# Altium footprint library Footprint.PcbLib: 154 footprints (part 7 of 10)
Each footprint in its own frame and in the unit in brackets; x right, y up, seen from the top. Pads: shape width x height; smd on the part's side, far side on the other; paste and mask are expansions set on the pad; w line width, h text height; cw(c..) or ccw(c..) is an arc to the next point about the centre after c.
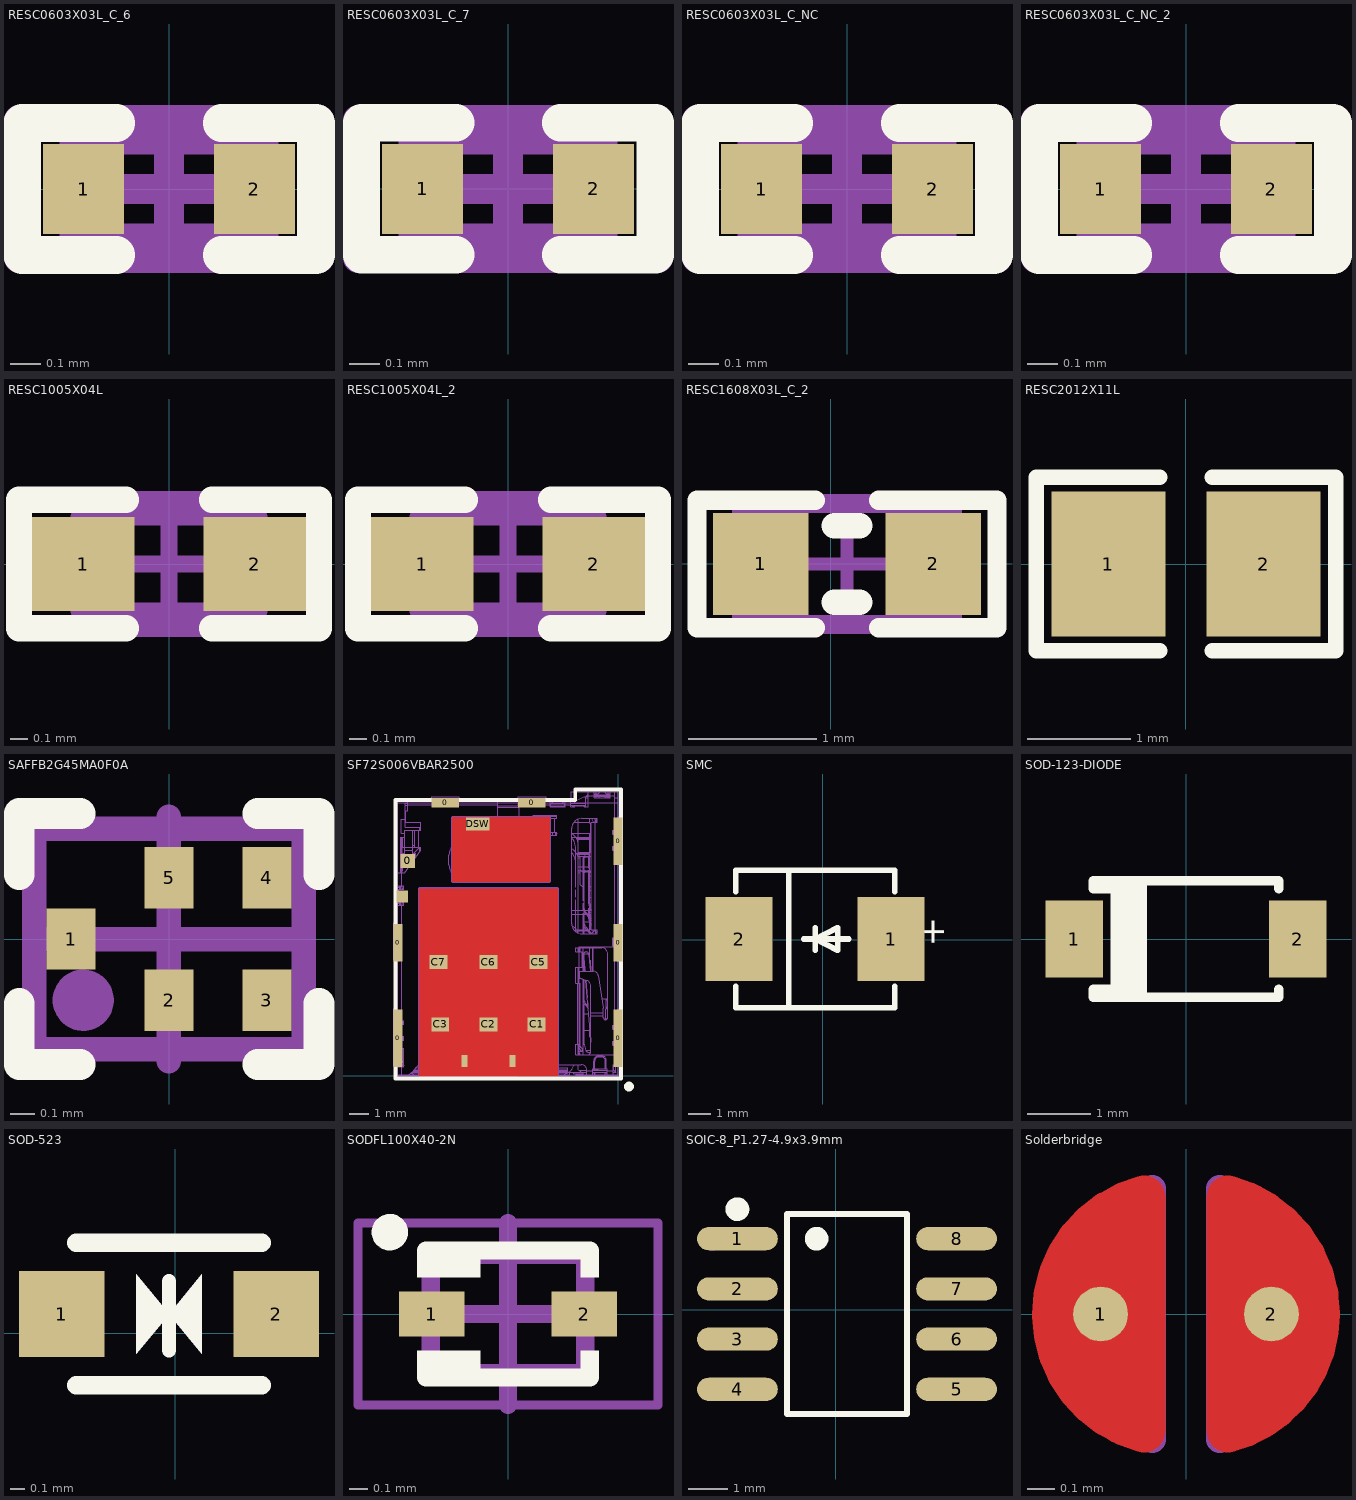
[diagram p6: the footprints below, top view; thin cyan lines are the x and y axes]

## RESC0603X03L_C_6 [mm]
pads (2):
  rect 0.27x0.3 smd: 1(-0.285,0) 2(0.285,0)
Top Overlay:
  lines w0.125: -0.175,-0.22 -0.49,-0.22 -0.49,0.22 -0.175,0.22 ; 0.175,-0.22 0.49,-0.22 0.49,0.22 0.175,0.22
Mechanical 7:
  lines w0.1: -0.315,-0.165 -0.315,0.165 0.315,0.165 0.315,-0.165 -0.315,-0.165
  text ".Designator" at -0.306,0.268 h0.3
Mechanical 15:
  lines w0.1: -0.165,0 0.165,0 ; 0,-0.165 0,0.165 ; -0.5,-0.23 -0.5,0.23 0.5,0.23 0.5,-0.23 -0.5,-0.23
3D body "User Library-res0201-1.step": height 0.23, standoff 0, extent -0.3,-0.15 0.3,0.15

## RESC0603X03L_C_7 [mm]
pads (2):
  rect 0.27x0.3 smd: 1(-0.285,0) 2(0.285,0)
Top Overlay:
  lines w0.125: -0.175,-0.22 -0.49,-0.22 -0.49,0.22 -0.175,0.22 ; 0.175,-0.22 0.49,-0.22 0.49,0.22 0.175,0.22
Mechanical 7:
  lines w0.1: -0.315,-0.165 -0.315,0.165 0.315,0.165 0.315,-0.165 -0.315,-0.165
  text ".Designator" at -0.306,0.268 h0.3
Mechanical 15:
  lines w0.1: -0.165,0 0.165,0 ; 0,-0.165 0,0.165 ; -0.5,-0.23 -0.5,0.23 0.5,0.23 0.5,-0.23 -0.5,-0.23
3D body "User Library-res0201-1.step": height 0.23, standoff 0, extent -0.3,-0.15 0.3,0.15

## RESC0603X03L_C_NC [mm]
pads (2):
  rect 0.27x0.3 smd: 1(-0.285,0) 2(0.285,0)
Top Overlay:
  lines w0.125: -0.175,-0.22 -0.49,-0.22 -0.49,0.22 -0.175,0.22 ; 0.175,-0.22 0.49,-0.22 0.49,0.22 0.175,0.22
Mechanical 7:
  lines w0.1: -0.315,-0.165 0.315,-0.165 0.315,0.165 -0.315,0.165 -0.315,-0.165
  text ".Designator" at -0.306,0.268 h0.3
Mechanical 15:
  lines w0.1: -0.165,0 0.165,0 ; 0,-0.165 0,0.165 ; -0.5,-0.23 0.5,-0.23 0.5,0.23 -0.5,0.23 -0.5,-0.23

## RESC0603X03L_C_NC_2 [mm]
pads (2):
  rect 0.27x0.3 smd: 1(-0.285,0) 2(0.285,0)
Top Overlay:
  lines w0.125: -0.175,-0.22 -0.49,-0.22 -0.49,0.22 -0.175,0.22 ; 0.175,-0.22 0.49,-0.22 0.49,0.22 0.175,0.22
Mechanical 7:
  lines w0.1: -0.315,-0.165 0.315,-0.165 0.315,0.165 -0.315,0.165 -0.315,-0.165
  text ".Designator" at -0.306,0.268 h0.3
Mechanical 15:
  lines w0.1: -0.165,0 0.165,0 ; 0,-0.165 0,0.165 ; -0.5,-0.23 0.5,-0.23 0.5,0.23 -0.5,0.23 -0.5,-0.23

## RESC1005X04L [mm]
pads (2):
  rect 0.6x0.55 smd: 1(-0.5,0) 2(0.5,0)
Top Overlay:
  lines w0.152: -0.25,-0.375 -0.875,-0.375 -0.875,0.375 -0.25,0.375 ; 0.25,-0.375 0.875,-0.375 0.875,0.375 0.25,0.375
Mechanical 7:
  lines w0.1: -0.525,-0.275 -0.525,0.275 0.525,0.275 0.525,-0.275 -0.525,-0.275
  text ".Designator" at -0.432,-0.152 h0.3
Mechanical 15:
  lines w0.1: -0.275,0 0.275,0 ; 0,-0.275 0,0.275 ; -0.875,-0.375 0.875,-0.375 0.875,0.375 -0.875,0.375 -0.875,-0.375
3D body "User Library-res0402-1.step": height 0.3, standoff 0, extent -0.5,-0.25 0.5,0.25

## RESC1005X04L_2 [mm]
pads (2):
  rect 0.6x0.55 smd: 1(-0.5,0) 2(0.5,0)
Top Overlay:
  lines w0.152: -0.25,-0.375 -0.875,-0.375 -0.875,0.375 -0.25,0.375 ; 0.25,-0.375 0.875,-0.375 0.875,0.375 0.25,0.375
Mechanical 7:
  lines w0.1: -0.525,-0.275 -0.525,0.275 0.525,0.275 0.525,-0.275 -0.525,-0.275
  text ".Designator" at -0.432,-0.152 h0.3
Mechanical 15:
  lines w0.1: -0.275,0 0.275,0 ; 0,-0.275 0,0.275 ; -0.875,-0.375 0.875,-0.375 0.875,0.375 -0.875,0.375 -0.875,-0.375
3D body "User Library-res0402-1.step": height 0.3, standoff 0, extent -0.5,-0.25 0.5,0.25

## RESC1608X03L_C_2 [mm]
pads (2):
  rect 0.75x0.8 smd mask+0.025: 1(-0.548,0) 2(0.802,0)
Top Overlay:
  lines w0.152: -0.123,-0.5 -1.048,-0.5 -1.048,0.5 -0.123,0.5 ; 0.377,-0.5 1.302,-0.5 1.302,0.5 0.377,0.5
  lines w0.2: 0.027,-0.3 0.227,-0.3 ; 0.027,0.3 0.227,0.3
Mechanical 7:
  lines w0.1: -0.723,-0.45 0.977,-0.45 0.977,0.45 -0.723,0.45 -0.723,-0.45
  text ".Designator" at -0.558,-0.142 h0.38
Mechanical 15:
  lines w0.1: -0.323,0 0.577,0 ; 0.127,-0.45 0.127,0.45 ; -1.048,-0.5 -1.048,0.5 1.302,0.5 1.302,-0.5 -1.048,-0.5
3D body "User Library-RESC1608X05N.step": height 0.45, standoff 0, extent -0.648,-0.425 0.902,0.425

## RESC2012X11L [mm]
pads (2):
  rect 1.1x1.4 smd mask+0.025: 1(-0.75,0) 2(0.75,0)
Top Overlay:
  lines w0.15: -0.254,-0.838 -1.448,-0.838 -1.448,0.838 -0.254,0.838 ; 0.254,-0.838 1.448,-0.838 1.448,0.838 0.254,0.838
3D body "User Library-0805 SMD Resistor.step": height 0.8, standoff 0.02, extent -1.025,-0.625 0.975,0.625

## SAFFB2G45MA0F0A [mm]
pads (5):
  rect 0.2x0.25 smd mask+0.04: 1(-0.4,0) 2(0,-0.25) 3(0.4,-0.25) 4(0.4,0.25) 5(0,0.25)
Top Overlay:
  lines w0.125: -0.613,-0.262 -0.613,-0.512 -0.362,-0.512 ; -0.613,0.262 -0.613,0.512 -0.362,0.512 ; 0.362,-0.512 0.613,-0.512 0.613,-0.262 ; 0.362,0.512 0.613,0.512 0.613,0.262
Mechanical 7:
  circle w0.15: c-0.35,-0.25 r0.05
  lines w0.1: -0.55,-0.45 0.55,-0.45 0.55,0.45 -0.55,0.45 -0.55,-0.45
  text ".Designator" at -0.4,0 h0.3
Mechanical 15:
  lines w0.05: -0.55,-0.45 -0.55,0.45 0.55,0.45 0.55,-0.45 -0.55,-0.45
  lines w0.1: -0.5,0 0.5,0 ; 0,-0.5 0,0.5
3D body: height 0.5, standoff 0, extent -0.55,-0.45 0.55,0.45

## SF72S006VBAR2500 [mm]
pads (18):
  rect 0.45x2.9 smd: 0(-11.175,1.9) 0(0,1.9)
  rect 0.45x1.9 smd: 0(-11.175,6.75) 0(0,6.75)
  rect 0.75x0.7 smd: 0(-10.675,10.9)
  rect 1.4x0.5 smd: 0(-8.78,13.85) 0(-4.38,13.85)
  rect 0.3x0.6 smd: 0(-7.8,0.75) 0(-5.36,0.75)
  rect 0.45x2.4 smd: 0(0,11.9)
  rect 0.9x0.7 smd: C1(-4.14,2.6) C2(-6.58,2.6) C3(-9.02,2.6) C5(-4.04,5.77) C6(-6.58,5.77) C7(-9.12,5.77)
  rect 0.6x0.6 smd: CSW(-10.95,9.1)
  rect 1.2x0.65 smd: DSW(-7.13,12.775)
Top Layer:
  pour cut-out: -10.084,9.5 -3.073,9.5 -3.073,-0.025 -10.084,-0.025
  pour cut-out: -8.407,13.106 -3.48,13.106 -3.48,9.855 -8.407,9.855
Top Overlay:
  lines w0.2: -11.3,-0.15 -11.3,14 -2.175,14 -2.175,14.525 0.15,14.525 0.15,-0.15 -11.3,-0.15
  lines w0.25: 0.443,-0.486 ccw(c0.55,-0.55) 0.462,-0.462
Mechanical 7:
  drawing of 1191 lines, arcs and shapes, not listed
  text ".Designator" at -6.214,5.15 h0.38
Mechanical 15:
  lines w0.05: -11.175,0 -11.175,13.85 0,13.85 0,0 -11.175,0
  lines w0.15: -5.16,0 -10.08,0 -10.08,9.5 -3.08,9.5 -3.08,0 ; -8.4,9.85 -3.48,9.85 -3.48,13.1 -8.4,13.1 -8.4,9.85
  text "NO VIA / NO TRACE" at -9.144,7.366 h0.55
  text "NO VIA / NO TRACE" at -8.382,10.668 h0.55
3D body "K3D-SF72S006VBA-V2_JAE_Proprietary.STEP": height 1.25, standoff 0, extent -11.2,0.05 0.02,14.4

## SMC [mm]
pads (2):
  rect 3.03x3.82 smd paste+0 mask+0.051: 1(3.102,0.037) 2(-3.768,0.037)
Top Overlay:
  lines w0.254: -3.933,-2.105 -3.933,-3.073 3.267,-3.073 3.267,-2.105 ; -3.933,2.178 -3.933,3.147 3.267,3.147 3.267,2.178 ; -1.525,-3.073 -1.525,3.147 ; -0.841,0.037 1.191,0.037 ; -0.333,0.545 -0.333,-0.471 -0.333,0.037 ; -0.333,0.037 0.683,-0.471 0.683,0.545 -0.333,0.037
  text "+" at 5.893,-0.305 h2
Mechanical 15:
  region: -4.663,0.291 -2.885,0.291 -2.885,-0.217 -4.663,-0.217
  region: 2.848,-0.858 2.848,0.92 3.356,0.92 3.356,-0.858
  region: 2.207,0.291 3.985,0.291 3.985,-0.217 2.207,-0.217
3D body "User Library-DO-214AB(SMC).step": height 2.77, standoff 0.13, extent -4.369,-3.15 3.759,3.15

## SOD-123-DIODE [mil]
pads (2):
  rect 36x48 smd: 1(-70,0) 2(70,0)
Top Overlay:
  region: -58.07,36.42 -58.07,28.54 -47.24,28.54 -47.24,-28.54 -58.07,-28.54 -58.07,-36.42 -24.61,-36.42 -24.61,36.42
  lines w5.91: -58.07,-31.5 -58.07,-36.42 58.07,-36.42 58.07,-31.5 ; -58.07,31.5 -58.07,36.42 58.07,36.42 58.07,31.5
3D body "User Library-SOD-123_DiodesInc.STEP": height 56.1, standoff -0.98, extent -76.77,-33.47 74.8,33.46

## SOD-523 [mm]
pads (2):
  rect 0.6x0.6 smd mask+0.08: 1(-0.792,0.133) 2(0.708,0.133)
Top Overlay:
  region: -0.042,0.133 -0.271,-0.146 -0.271,0.413
  region: -0.042,0.133 0.186,0.413 0.186,-0.146
  lines w0.1: -0.042,-0.121 -0.042,0.362
  lines w0.13: -0.692,-0.367 0.608,-0.367 ; -0.692,0.633 0.608,0.633
Mechanical 15:
  region: 0.186,0.413 0.186,-0.146 -0.042,0.133
  region: -0.271,0.413 -0.271,-0.146 -0.042,0.133
3D body "User Library-SOD523-3.STEP": height 0.65, standoff 0, extent -0.901,-0.273 0.749,0.527

## SODFL100X40-2N [mm]
pads (2):
  rect 0.36x0.25 smd: 1(-0.42,0) 2(0.42,0)
Top Overlay:
  circle w0.1: c-0.65,0.45 r0.05
  rectangle: -0.5,0.2 -0.15,0.325
  rectangle: -0.5,-0.35 -0.15,-0.2
  rectangle: 0.4,-0.35 0.5,-0.2
  rectangle: 0.4,0.2 0.5,0.35
  lines w0.1: -0.45,-0.3 -0.45,-0.35 0.45,-0.35 0.45,-0.3 ; -0.45,0.3 -0.45,0.35 0.45,0.35 0.45,0.3
Mechanical 7:
  lines w0.1: -0.425,-0.325 0.425,-0.325 0.425,0.325 -0.425,0.325 -0.425,-0.325
  text ".Designator" at -0.724,-0.177 h0.38
Mechanical 15:
  lines w0.05: -0.825,-0.5 -0.825,0.5 0.825,0.5 0.825,-0.5 -0.825,-0.5
  lines w0.1: -0.5,0 0.5,0 ; 0,-0.5 0,0.5
3D body "SODFL100X40-2N.step": height 0.4, standoff 0, extent -0.5,-0.325 0.5,0.325

## SOIC-8_P1.27-4.9x3.9mm [mm]
pads (8):
  oval 2.045x0.588 smd paste+0 mask+0.051: 1(-2.49,1.796) 2(-2.49,0.526) 3(-2.49,-0.744) 4(-2.49,-2.014) 5(3.055,-2.014) 6(3.055,-0.744) 7(3.055,0.526) 8(3.055,1.796)
Top Overlay:
  circle w0.3: c-0.487,1.796 r0.15
  circle w0.3: c-2.49,2.542 r0.15
  lines w0.152: -1.239,-2.635 1.804,-2.635 1.804,2.417 -1.239,2.417 -1.239,-2.635
Mechanical 15:
  circle w0.3: c-3.118,1.796 r0.15
3D body "User Library-SOIC-8-1.step": height 1.75, standoff 0, extent -2.766,-2.628 3.234,2.272

## Solderbridge [mm]
pads (2):
  round 0.2 smd paste-10: 1(-0.312,0) 2(0.312,0)
Top Layer:
  region: 0.077,0.432 0.152,0.505 0.271,0.467 0.335,0.424 0.409,0.351 0.462,0.292 0.521,0.193 0.549,0.099 0.544,-0.122 0.518,-0.193 0.434,-0.33 0.351,-0.411 0.259,-0.469 0.157,-0.5 0.107,-0.483 0.077,-0.43
  region: -0.077,-0.432 -0.152,-0.505 -0.271,-0.467 -0.335,-0.424 -0.409,-0.351 -0.462,-0.292 -0.521,-0.193 -0.549,-0.099 -0.544,0.122 -0.518,0.193 -0.434,0.33 -0.351,0.411 -0.259,0.469 -0.157,0.5 -0.107,0.483 -0.077,0.43
  lines w0.152: -0.153,-0.431 cw(c-0.042,0) -0.461,-0.149 cw(c-0.042,0) -0.153,0.431 ; 0.153,-0.431 ccw(c0.042,0) 0.413,-0.245 ccw(c0.042,0) 0.487,0 ccw(c0.042,0) 0.153,0.431
Top Solder:
  circle w0.61: c-0.003,0 r0.279
Mechanical 7:
  lines w0.1: -0.123,-0.459 cw(c-0.042,0) -0.123,0.459 -0.123,-0.459 ; 0.123,-0.459 ccw(c0.042,0) 0.123,0.459 0.123,-0.459
  text ".Designator" at -0.635,0.635 h0.38